# Altium footprint library General.PcbLib: 40 footprints (part 2 of 3)
Each footprint in its own frame and in the unit in brackets; x right, y up, seen from the top. Pads: shape width x height; smd on the part's side, far side on the other; paste and mask are expansions set on the pad; w line width, h text height; cw(c..) or ccw(c..) is an arc to the next point about the centre after c.
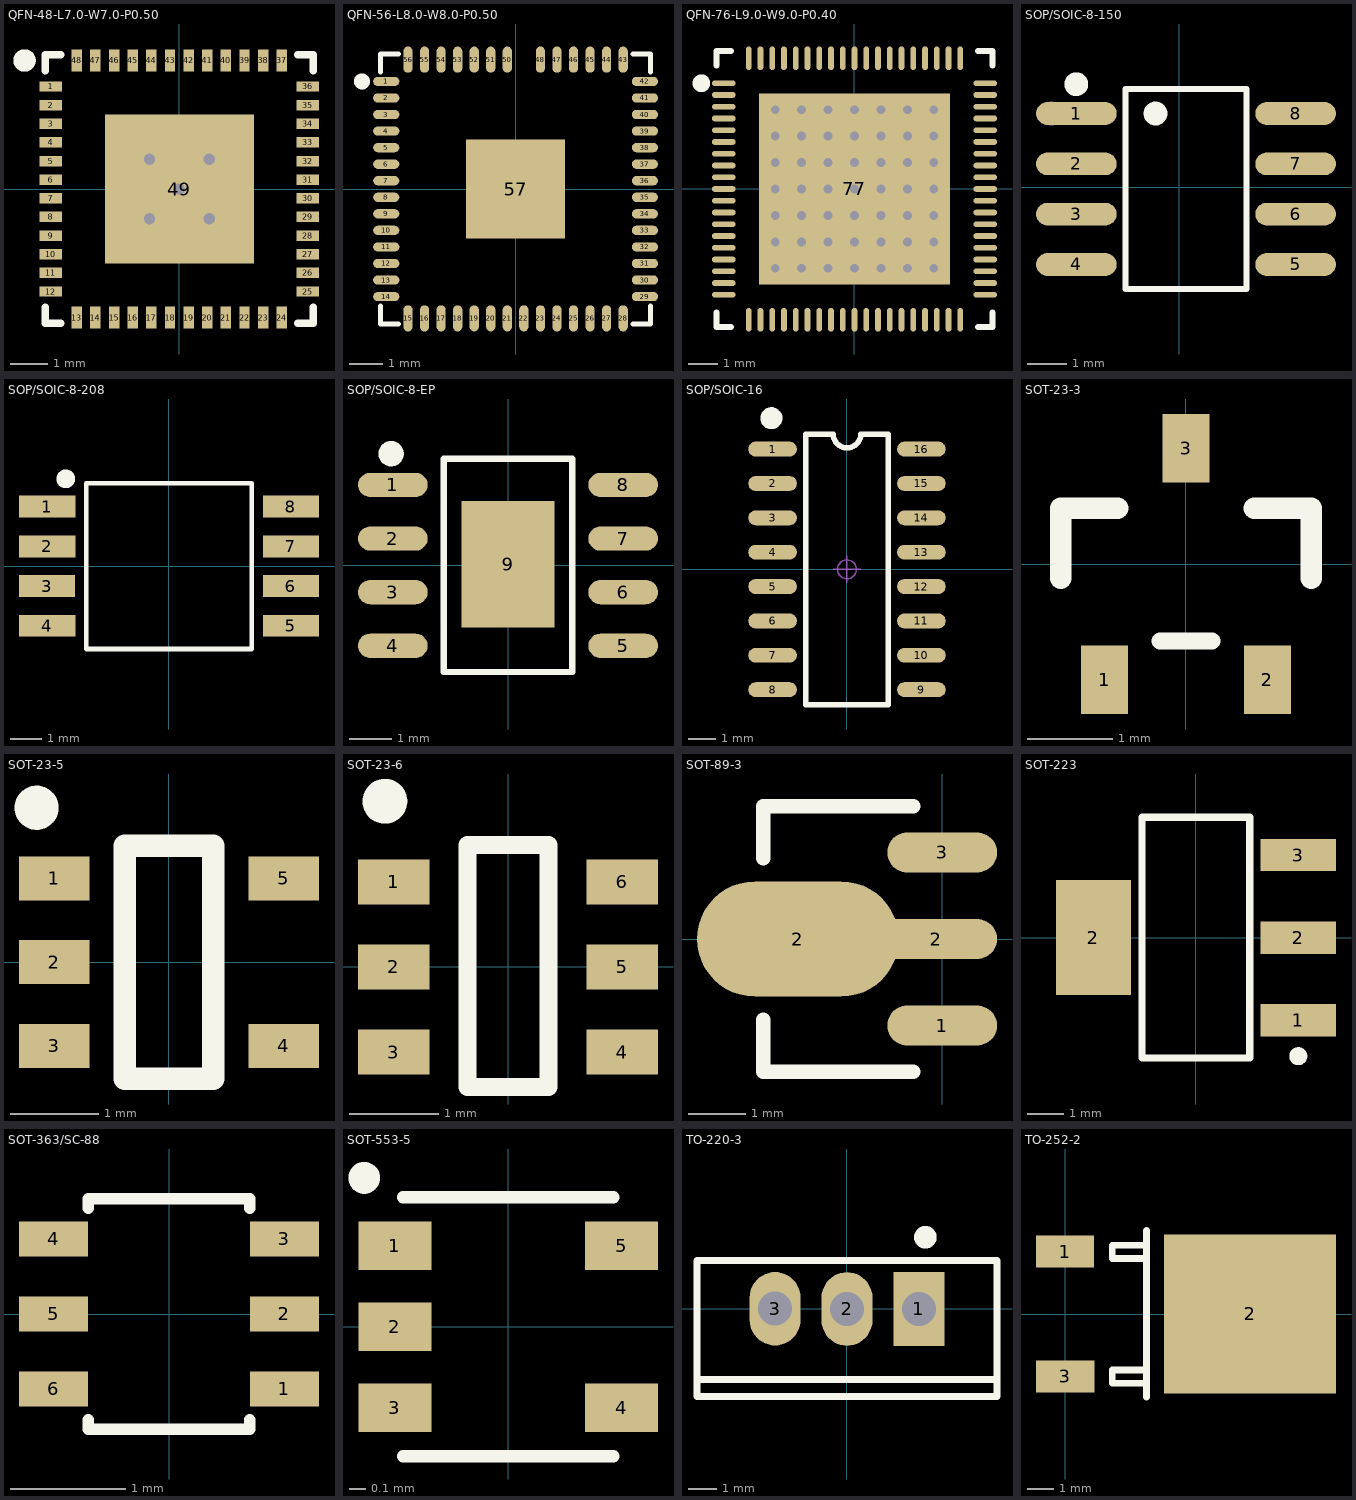
[diagram p1: the footprints below, top view; thin cyan lines are the x and y axes]

## QFN-48-L7.0-W7.0-P0.50 [mm] "L7.0-W7.0-P0.5——STM32xxxxCxUx"
pads (49):
  rect 0.6x0.28 smd mask+0.05: 1(-3.449,2.751) 2(-3.449,2.25) 3(-3.449,1.75) 4(-3.449,1.25) 5(-3.449,0.749) 6(-3.449,0.249) 7(-3.449,-0.249) 8(-3.449,-0.749) 9(-3.449,-1.25) 10(-3.449,-1.75) 11(-3.449,-2.25) 12(-3.449,-2.751) 25(3.449,-2.751) 26(3.449,-2.25) 27(3.449,-1.75) 28(3.449,-1.25) 29(3.449,-0.749) 30(3.449,-0.249) 31(3.449,0.249) 32(3.449,0.749) 33(3.449,1.25) 34(3.449,1.75) 35(3.449,2.25) 36(3.449,2.751)
  rect 0.28x0.6 smd mask+0.05: 13(-2.751,-3.449) 14(-2.25,-3.449) 15(-1.75,-3.449) 16(-1.25,-3.449) 17(-0.749,-3.449) 18(-0.249,-3.449) 19(0.249,-3.449) 20(0.749,-3.449) 21(1.25,-3.449) 22(1.75,-3.449) 23(2.251,-3.449) 24(2.751,-3.449) 37(2.751,3.449) 38(2.251,3.449) 39(1.75,3.449) 40(1.25,3.449) 41(0.749,3.449) 42(0.249,3.449) 43(-0.249,3.449) 44(-0.749,3.449) 45(-1.25,3.449) 46(-1.75,3.449) 47(-2.25,3.449) 48(-2.751,3.449)
  rect 4x4 smd mask+0.05: 49(0,0)
via 0.8,-0.8 diameter 0.508 hole 0.305
via -0.8,-0.8 diameter 0.508 hole 0.305
via 0,0 diameter 0.508 hole 0.305
via 0.8,0.8 diameter 0.508 hole 0.305
via -0.8,0.8 diameter 0.508 hole 0.305
Top Overlay:
  lines w0.2: -3.6,-3.175 -3.6,-3.6 -3.175,-3.6 ; -3.6,3.175 -3.6,3.6 -3.175,3.6 ; 3.175,-3.6 3.6,-3.6 3.6,-3.175 ; 3.175,3.6 3.6,3.6 3.6,3.175
  lines w0.3: -4.001,3.449 cw(c-4.151,3.45) -4.001,3.451
3D body "ALSRobot-QFN48 7x7.step": height 0.78, standoff -0.02, extent -3.51,-3.51 3.51,3.51

## QFN-56-L8.0-W8.0-P0.50 [mm] "L8.0-W8.0-P0.5——CY7C68013A"
pads (56):
  oval 0.79x0.28 smd paste-100 mask+0.05: 1(-3.908,3.25) 2(-3.908,2.75) 3(-3.908,2.25) 4(-3.908,1.75) 5(-3.908,1.25) 6(-3.908,0.75) 7(-3.908,0.25) 8(-3.908,-0.25) 9(-3.908,-0.75) 10(-3.908,-1.25) 11(-3.908,-1.75) 12(-3.908,-2.25) 13(-3.908,-2.75) 14(-3.908,-3.25) 29(3.908,-3.25) 30(3.908,-2.75) 31(3.908,-2.25) 32(3.908,-1.75) 33(3.908,-1.25) 34(3.908,-0.75) 35(3.908,-0.25) 36(3.908,0.25) 37(3.908,0.75) 38(3.908,1.25) 39(3.908,1.75) 40(3.908,2.25) 41(3.908,2.75) 42(3.908,3.25)
  oval 0.28x0.79 smd paste-100 mask+0.05: 15(-3.25,-3.908) 16(-2.75,-3.908) 17(-2.25,-3.908) 18(-1.75,-3.908) 19(-1.25,-3.908) 20(-0.75,-3.908) 21(-0.25,-3.908) 22(0.25,-3.908) 23(0.75,-3.908) 24(1.25,-3.908) 25(1.75,-3.908) 26(2.25,-3.908) 27(2.75,-3.908) 28(3.25,-3.908) 43(3.25,3.908) 44(2.75,3.908) 45(2.25,3.908) 46(1.75,3.908) 47(1.25,3.908) 48(0.75,3.908) 50(-0.25,3.908) 51(-0.75,3.908) 52(-1.25,3.908) 53(-1.75,3.908) 54(-2.25,3.908) 55(-2.75,3.908) 56(-3.25,3.908)
  rect 3x3 smd paste-100 mask+0.05: 57(0,0)
Top Overlay:
  circle w0.24: c-4.641,3.25 r0.12
  lines w0.152: -4.076,-3.542 -4.076,-4.076 -3.542,-4.076 ; -4.076,3.542 -4.076,4.076 -3.542,4.076 ; 3.542,-4.076 4.076,-4.076 4.076,-3.542 ; 3.542,4.076 4.076,4.076 4.076,3.542
Top Paste:
  drawing of 55 lines, arcs and shapes, not listed
3D body "QFN-(8x8).STEP": height 0.88, standoff -0.02, extent -4.01,-4.01 4.01,4.01

## QFN-76-L9.0-W9.0-P0.40 [mm] "L9.0-W9.0-P0.40"
pads (77):
  oval 0.8x0.2 smd paste-100 mask+0.051: 1(-4.45,3.599) 2(-4.45,3.2) 3(-4.45,2.799) 4(-4.45,2.4) 5(-4.45,1.999) 6(-4.45,1.6) 7(-4.45,1.199) 8(-4.45,0.8) 9(-4.45,0.399) 10(-4.45,0) 11(-4.45,-0.399) 12(-4.45,-0.8) 13(-4.45,-1.199) 14(-4.45,-1.6) 15(-4.45,-1.999) 16(-4.45,-2.4) 17(-4.45,-2.799) 18(-4.45,-3.2) 19(-4.45,-3.599) 39(4.45,-3.599) 40(4.45,-3.2) 41(4.45,-2.799) 42(4.45,-2.4) 43(4.45,-1.999) 44(4.45,-1.6) 45(4.45,-1.199) 46(4.45,-0.8) 47(4.45,-0.399) 48(4.45,0) 49(4.45,0.399) 50(4.45,0.8) 51(4.45,1.199) 52(4.45,1.6) 53(4.45,1.999) 54(4.45,2.4) 55(4.45,2.799) 56(4.45,3.2) 57(4.45,3.599)
  oval 0.2x0.8 smd paste-100 mask+0.051: 20(-3.599,-4.45) 21(-3.2,-4.45) 22(-2.799,-4.45) 23(-2.4,-4.45) 24(-1.999,-4.45) 25(-1.6,-4.45) 26(-1.199,-4.45) 27(-0.8,-4.45) 28(-0.399,-4.45) 29(0,-4.45) 30(0.399,-4.45) 31(0.8,-4.45) 32(1.199,-4.45) 33(1.6,-4.45) 34(1.999,-4.45) 35(2.4,-4.45) 36(2.799,-4.45) 37(3.2,-4.45) 38(3.599,-4.45) 58(3.599,4.45) 59(3.2,4.45) 60(2.799,4.45) 61(2.4,4.45) 62(1.999,4.45) 63(1.6,4.45) 64(1.199,4.45) 65(0.8,4.45) 66(0.399,4.45) 67(0,4.45) 68(-0.399,4.45) 69(-0.8,4.45) 70(-1.199,4.45) 71(-1.6,4.45) 72(-1.999,4.45) 73(-2.4,4.45) 74(-2.799,4.45) 75(-3.2,4.45) 76(-3.599,4.45)
  rect 6.5x6.5 smd paste-100 mask+0.051: 77(0,0)
via 2.7,-2.7 diameter 0.5 hole 0.3
via 2.7,-1.8 diameter 0.5 hole 0.3
via 2.7,-0.9 diameter 0.5 hole 0.3
via 1.8,-2.7 diameter 0.5 hole 0.3
via 1.8,-1.8 diameter 0.5 hole 0.3
via 1.8,-0.9 diameter 0.5 hole 0.3
via 0.9,-2.7 diameter 0.5 hole 0.3
via 0.9,-1.8 diameter 0.5 hole 0.3
via 0.9,-0.9 diameter 0.5 hole 0.3
via -2.7,-2.7 diameter 0.5 hole 0.3
via -2.7,-1.8 diameter 0.5 hole 0.3
via -2.7,-0.9 diameter 0.5 hole 0.3
via -1.8,-2.7 diameter 0.5 hole 0.3
via -1.8,-1.8 diameter 0.5 hole 0.3
via -1.8,-0.9 diameter 0.5 hole 0.3
via -0.9,-2.7 diameter 0.5 hole 0.3
via -0.9,-1.8 diameter 0.5 hole 0.3
via -0.9,-0.9 diameter 0.5 hole 0.3
via 0,-2.7 diameter 0.5 hole 0.3
via 0,-1.8 diameter 0.5 hole 0.3
via 0,-0.9 diameter 0.5 hole 0.3
via 0,0 diameter 0.5 hole 0.3
via -2.7,2.7 diameter 0.5 hole 0.3
via -2.7,1.8 diameter 0.5 hole 0.3
via -2.7,0.9 diameter 0.5 hole 0.3
via -2.7,0 diameter 0.5 hole 0.3
via -1.8,2.7 diameter 0.5 hole 0.3
via -1.8,1.8 diameter 0.5 hole 0.3
via -1.8,0.9 diameter 0.5 hole 0.3
via -1.8,0 diameter 0.5 hole 0.3
via -0.9,2.7 diameter 0.5 hole 0.3
via -0.9,1.8 diameter 0.5 hole 0.3
via -0.9,0.9 diameter 0.5 hole 0.3
via -0.9,0 diameter 0.5 hole 0.3
via 2.7,2.7 diameter 0.5 hole 0.3
via 2.7,1.8 diameter 0.5 hole 0.3
via 2.7,0.9 diameter 0.5 hole 0.3
via 2.7,0 diameter 0.5 hole 0.3
via 1.8,2.7 diameter 0.5 hole 0.3
via 1.8,1.8 diameter 0.5 hole 0.3
via 1.8,0.9 diameter 0.5 hole 0.3
via 1.8,0 diameter 0.5 hole 0.3
via 0.9,2.7 diameter 0.5 hole 0.3
via 0.9,1.8 diameter 0.5 hole 0.3
via 0.9,0.9 diameter 0.5 hole 0.3
via 0.9,0 diameter 0.5 hole 0.3
via 0,2.7 diameter 0.5 hole 0.3
via 0,1.8 diameter 0.5 hole 0.3
via 0,0.9 diameter 0.5 hole 0.3
via -2.7,0 diameter 0.5 hole 0.3
via -1.8,0 diameter 0.5 hole 0.3
via -0.9,0 diameter 0.5 hole 0.3
via 2.7,0 diameter 0.5 hole 0.3
via 1.8,0 diameter 0.5 hole 0.3
via 0.9,0 diameter 0.5 hole 0.3
Top Overlay:
  lines w0.2: -4.7,-4.2 -4.7,-4.7 -4.2,-4.7 ; -4.7,4.2 -4.7,4.7 -4.2,4.7 ; 4.2,-4.7 4.7,-4.7 4.7,-4.2 ; 4.2,4.7 4.7,4.7 4.7,4.2
  lines w0.3: -5.06,3.597 cw(c-5.21,3.599) -5.36,3.599 cw(c-5.21,3.599) -5.06,3.6
Top Paste:
  drawing of 77 lines, arcs and shapes, not listed
3D body "QFN-76(9x9).step": height 0.85, standoff 0, extent -4.5,-4.5 4.5,4.5

## SOP/SOIC-8-150 [mm] "L5.0-W4.0-P1.27"
pads (8):
  oval 2.036x0.574 smd paste+0 mask+0.051: 1(-2.6,1.86) 2(-2.6,0.59) 3(-2.6,-0.68) 4(-2.6,-1.95) 5(2.936,-1.95) 6(2.936,-0.68) 7(2.936,0.59) 8(2.936,1.86)
Top Overlay:
  circle w0.3: c-2.6,2.599 r0.15
  circle w0.3: c-0.601,1.86 r0.15
  lines w0.152: -1.354,-2.571 -1.354,2.481 1.689,2.481 1.689,-2.571 -1.354,-2.571
Mechanical 15:
  circle w0.3: c-3.23,1.86 r0.15
3D body "User Library-so8-3.step": height 1.7, standoff 0, extent -2.832,-2.501 3.168,2.399

## SOP/SOIC-8-208 [mm] "L5.3-W5.3-P1.27"
pads (8):
  rect 1.8x0.7 smd paste+0 mask+0.05: 1(-3.9,1.905) 2(-3.9,0.635) 3(-3.9,-0.635) 4(-3.9,-1.905) 5(3.9,-1.905) 6(3.9,-0.635) 7(3.9,0.635) 8(3.9,1.905)
Top Overlay:
  circle w0.3: c-3.302,2.794 r0.15
  lines w0.15: -2.65,-2.65 2.65,-2.65 2.65,2.65 -2.65,2.65 -2.65,-2.65
3D body "SOP-8-208mil.STEP": height 2, standoff -0.07, extent -3.953,-2.65 3.953,2.65

## SOP/SOIC-8-EP [mil] "L5.0-W4.0-P1.27"
pads (9):
  oval 65x22.6 smd paste+0 mask+2: 1(-107.39,75) 2(-107.39,25) 3(-107.39,-25) 4(-107.39,-75) 5(107.39,-75) 6(107.39,-25) 7(107.39,25) 8(107.39,75)
  rect 86.61x118.11 smd: 9(0,1.03)
Top Overlay:
  circle w11.81: c-108.97,104.11 r5.91
  lines w6: -59.9,-99.46 -59.9,99.46 59.9,99.46 59.9,-99.46 -59.9,-99.46
3D body "User Library-so8-3.step": height 66.93, standoff 0, extent -118.11,-96.7 118.11,96.21

## SOP/SOIC-16 [mm] "10.3*6.2*1.8mm"
height 1.75
pads (16):
  oval 1.8x0.55 smd: 1(-2.75,4.445) 2(-2.75,3.175) 3(-2.75,1.905) 4(-2.75,0.635) 5(-2.75,-0.635) 6(-2.75,-1.905) 7(-2.75,-3.175) 8(-2.75,-4.445) 9(2.75,-4.445) 10(2.75,-3.175) 11(2.75,-1.905) 12(2.75,-0.635) 13(2.75,0.635) 14(2.75,1.905) 15(2.75,3.175) 16(2.75,4.445)
Top Overlay:
  circle w0.5: c-2.794,5.588 r0.155
  lines w0.2: -1.524,5 -1.524,-5 1.524,-5 1.524,5
  lines w0.203: -1.524,5 -0.508,5 ccw(c0,5) 0,4.492 ccw(c0,5) 0.508,5 1.524,5
Mechanical 15:
  circle w0.05: c0,0 r0.35
  lines w0.05: -0.5,0 0.5,0 ; 0,-0.5 0,0.5
3D body "SOP16.STEP": height 1.9, standoff 0, extent -3.003,-5 3.003,5

## SOT-23-3 [mm]
height 2.8
pads (3):
  rect 0.55x0.8 smd: 1(-0.95,-1.35) 2(0.95,-1.35) 3(0,1.35)
Top Overlay:
  lines w0.2: -0.3,-0.9 0.3,-0.9
  lines w0.254: -1.46,-0.165 -1.46,0.65 -0.8,0.65 ; 1.46,-0.165 1.46,0.65 ; 0.8,0.65 1.46,0.65 ; 0.8,0.65 1.46,0.65 ; 0.8,0.65 1.46,0.65
3D body "SOT-23.step": height 1.3, standoff 0, extent -1.5,-1.5 1.5,1.5

## SOT-23-5 [mm]
height 1.45
pads (5):
  rect 0.8x0.5 smd: 1(-1.3,0.95) 2(-1.3,0) 3(-1.3,-0.95) 4(1.3,-0.95) 5(1.3,0.95)
Top Overlay:
  circle w0.25: c-1.5,1.75 r0.125
  lines w0.254: -0.5,-1.32 0.5,-1.32 0.5,1.32 -0.5,1.32 -0.5,-1.32
3D body "User Library-SOT23-5-2.step": height 1.45, standoff 0, extent -1.4,-1.45 1.4,1.45

## SOT-23-6 [mm]
height 1.45
pads (6):
  rect 0.8x0.5 smd: 1(-1.275,0.95) 2(-1.275,0) 3(-1.275,-0.95) 4(1.275,-0.95) 5(1.275,0) 6(1.275,0.95)
Top Overlay:
  circle w0.25: c-1.375,1.85 r0.125
  lines w0.2: -0.45,-1.34 0.45,-1.34 0.45,1.36 -0.45,1.36 -0.45,-1.34
3D body "User Library-sot-23-6-5.step": height 1.25, standoff 0, extent -1.419,-1.443 1.419,1.457

## SOT-89-3 [mm]
height 1.45
pads (4):
  oval 1.9x0.7 smd: 1(0,-1.5) 3(0,1.5)
  oval 3.5x2 smd: 2(-2.5,0)
  oval 2.1x0.7 smd: 2(-0.1,0)
Top Overlay:
  lines w0.254: -3.1,-1.4 -3.1,-2.3 -0.5,-2.3 ; -3.1,1.4 -3.1,2.3 -0.5,2.3
3D body "SOT-89-3.STEP": height 1.51, standoff 0, extent -3.75,-2.25 0.55,2.25

## SOT-223 [mm]
height 1.8
pads (4):
  rect 2.1x0.9 smd: 1(2.85,-2.3) 2(2.85,0) 3(2.85,2.3)
  rect 2.1x3.2 smd: 2(-2.85,0)
Top Overlay:
  circle w0.25: c2.85,-3.3 r0.125
  lines w0.2: -1.5,-3.35 1.5,-3.35 1.5,3.35 -1.5,3.35 -1.5,-3.35
3D body "User Library-SOT-223-4.STEP": height 1.65, standoff 0, extent -3.543,-3.25 3.543,3.25

## SOT-363/SC-88 [mm] "SOT-363/SC-88"
pads (6):
  rect 0.6x0.3 smd mask+0.05: 1(1,-0.65) 2(1,0) 3(1,0.65) 4(-1,0.65) 5(-1,0) 6(-1,-0.65)
Top Overlay:
  lines w0.1: -0.7,-0.918 -0.7,-1 0.7,-1 0.7,-0.918 ; -0.7,0.918 -0.7,1 0.7,1 0.7,0.918
3D body "SC-88.STEP": height 1.25, standoff 0, extent -1.056,-1 1.056,1

## SOT-553-5 [mm]
pads (5):
  rect 0.45x0.3 smd paste+0 mask+0.05: 1(-0.7,0.5) 2(-0.7,0) 3(-0.7,-0.5) 4(0.7,-0.5) 5(0.7,0.5)
Top Overlay:
  circle w0.12: c-0.89,0.92 r0.038
  lines w0.076: -0.65,-0.8 0.65,-0.8 ; -0.65,0.8 0.65,0.8
3D body "SOT-553.step": height 0.61, standoff 0, extent -0.8,-0.8 0.8,0.8

## TO-220-3 [mm] "TO-220-3"
pads (3):
  rect 1.8x2.6 hole 1.2: 1(2.54,-0.005)
  oval 1.8x2.6 hole 1.2: 2(0,-0.005) 3(-2.54,0.005)
Top Overlay:
  lines w0.254: -5.3,-2.495 5.3,-2.495 ; -5.301,-3.094 5.301,-3.094 5.301,-3.089 5.301,1.704 -5.301,1.704 -5.301,-3.094
  lines w0.4: 2.767,2.33 cw(c2.769,2.53) 2.77,2.33
3D body "User Library-L7805.step": height 26.95, standoff -1.87, extent -5.08,-2.665 5.08,1.53

## TO-252-2 [mm] "TO-252-2"
height 1.45
pads (3):
  rect 2.2x1.2 smd: 1(0,2.361) 3(0.004,-2.361)
  rect 6.5x6 smd: 2(7,0)
Top Overlay:
  lines w0.254: 3.079,-3.141 3.079,3.159 ; 3.079,2.1 1.779,2.1 1.779,2.6 3.079,2.6 ; 3.084,-2.623 1.784,-2.623 1.784,-2.123 3.084,-2.123
3D body "TO-252.STEP": height 2.44, standoff 0.03, extent -0.2,-3.27 9.738,3.27